# Altium footprint library 01543_15DR.PcbLib: 1 footprints
Each footprint in its own frame and in the unit in brackets; x right, y up, seen from the top. Pads: shape width x height; smd on the part's side, far side on the other; paste and mask are expansions set on the pad; w line width, h text height; cw(c..) or ccw(c..) is an arc to the next point about the centre after c.
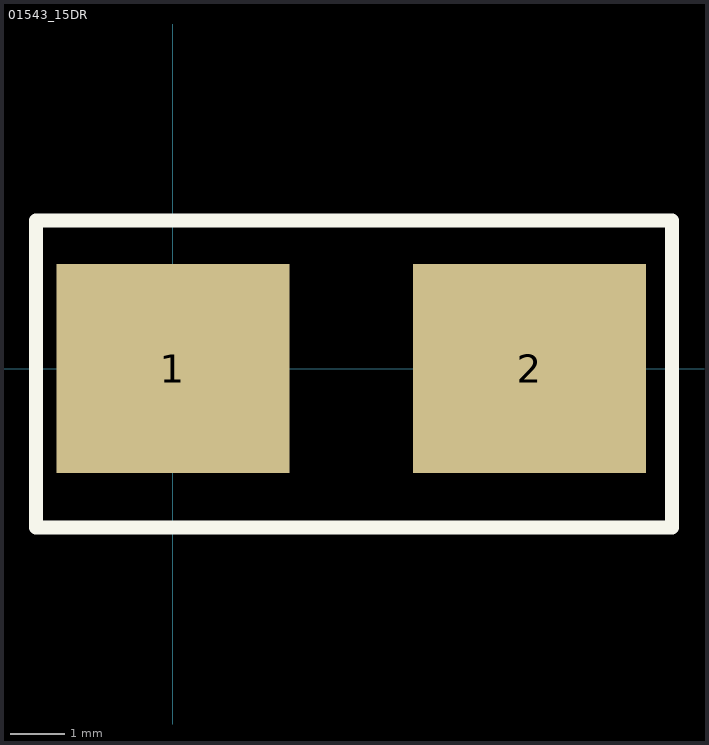
[diagram p0: the footprint, top view; thin cyan lines are the x and y axes]

## 01543_15DR [mm]
pads (2):
  rect 4.24x3.81 smd: 1(0,0) 2(6.5,0)
Top Overlay:
  lines w0.254: -2.5,-2.9 9.1,-2.9 9.1,2.7 -2.5,2.7 -2.5,-2.9
3D body "01543.15DRL.STEP": height 3.81, standoff 0, extent -1.665,-2.615 8.065,2.415